# Altium footprint library Hydrolib_pcb.PcbLib: 62 footprints (part 2 of 4)
Each footprint in its own frame and in the unit in brackets; x right, y up, seen from the top. Pads: shape width x height; smd on the part's side, far side on the other; paste and mask are expansions set on the pad; w line width, h text height; cw(c..) or ccw(c..) is an arc to the next point about the centre after c.
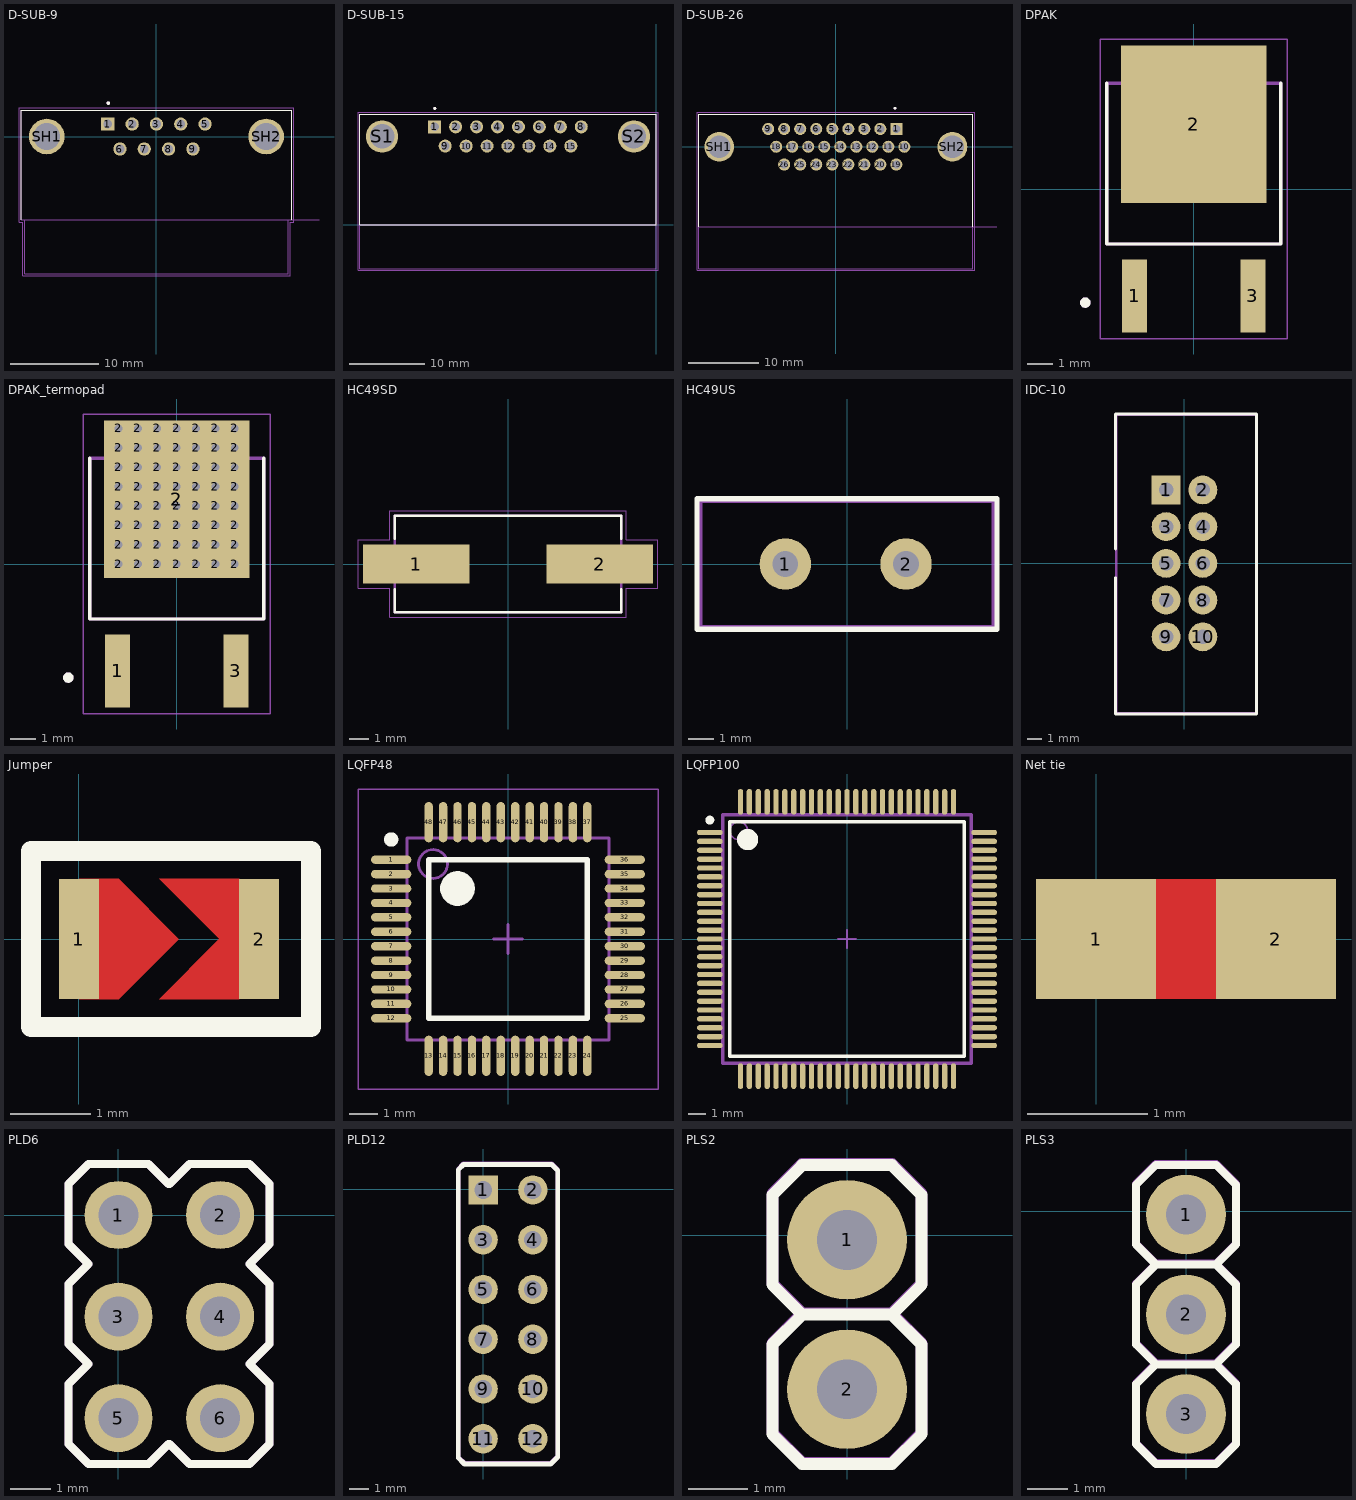
[diagram p1: the footprints below, top view; thin cyan lines are the x and y axes]

## D-SUB-9 [mm]
height 12.8
pads (11):
  rect 1.508x1.508 / inner round 1.508 / far side rect 1.508x1.508 hole 1: 1(-5.54,1.42)
  round 1.508 hole 1: 2(-2.77,1.42) 3(0,1.42) 4(2.77,1.42) 5(5.54,1.42) 6(-4.155,-1.42) 7(-1.385,-1.42) 8(1.385,-1.42) 9(4.155,-1.42)
  round 4.066 hole 3.05: SH1(-12.495,0) SH2(12.495,0)
Top Overlay:
  circle w0.2: c-5.48,3.8 r0.1
  lines w0.127: -15.405,-9.5 -15.405,3 15.405,3 15.405,-9.5
Mechanical 13:
  circle w0.2: c-5.48,3.8 r0.1
  lines w0.127: 18.51,-9.5 15.405,-9.5 ; -15,-9.5 15,-9.5 ; -15,-9.5 -15,-15.6 15,-15.6 15,-9.5 ; -15,-9.5 -15.405,-9.5 -15.405,3 15.405,3 15.405,-9.5 ; 15,-9.5 15.405,-9.5
  text "PCB Edge" at 16,-9.31 h0.81
Mechanical 15:
  lines w0.05: -15.655,-9.75 -15.25,-9.75 -15.25,-15.85 15.25,-15.85 15.25,-9.75 15.655,-9.75 15.655,3.25 -15.655,3.25 -15.655,-9.75
3D body "A-DS 09 A_KG-T2S.STEP": height 12.8, standoff -4.4, extent -15.405,-15.55 15.405,3.05

## D-SUB-15 [mm]
height 12.93
pads (17):
  rect 1.725x1.725 / inner round 1.725 / far side rect 1.725x1.725 hole 1.15: 1(-29.286,12.929)
  round 1.725 hole 1.15: 2(-26.516,12.929) 3(-23.746,12.929) 4(-20.976,12.929) 5(-18.206,12.929) 6(-15.436,12.929) 7(-12.666,12.929) 8(-9.896,12.929) 9(-27.901,10.389) 10(-25.131,10.389) 11(-22.361,10.389) 12(-19.591,10.389) 13(-16.821,10.389) 14(-14.051,10.389) 15(-11.281,10.389)
  round 4.266 hole 3.25: S1(-36.251,11.659) S2(-2.931,11.659)
Top Overlay:
  circle w0.2: c-29.281,15.376 r0.1
  lines w0.127: -39.186,-0.011 0.004,-0.011 0.004,14.589 -39.186,14.589 -39.186,-0.011
Mechanical 13:
  circle w0.2: c-29.281,15.376 r0.1
  lines w0.127: -39.186,-0.011 -39.186,-5.811 0.004,-5.811 0.004,-0.011 ; -39.186,-0.011 -39.186,14.589 0.004,14.589 0.004,-0.011 ; -39.186,-0.011 0.004,-0.011
Mechanical 15:
  lines w0.05: -39.436,-6.061 -39.436,14.839 0.254,14.839 0.254,-6.061 -39.436,-6.061
3D body "step_temp.STEP": height 12.55, standoff -4.18, extent -39.186,-5.811 0.004,14.589

## D-SUB-26 [mm]
pads (28):
  rect 1.725x1.725 / inner round 1.725 / far side rect 1.725x1.725 hole 1.15: 1(8.65,2.54)
  round 1.725 hole 1.15: 2(6.36,2.54) 3(4.07,2.54) 4(1.78,2.54) 5(-0.51,2.54) 6(-2.8,2.54) 7(-5.09,2.54) 8(-7.38,2.54) 9(-9.67,2.54) 10(9.795,0) 11(7.505,0) 12(5.215,0) 13(2.925,0) 14(0.635,0) 15(-1.655,0) 16(-3.945,0) 17(-6.235,0) 18(-8.525,0) 19(8.65,-2.54) 20(6.36,-2.54) 21(4.07,-2.54) 22(1.78,-2.54) 23(-0.51,-2.54) 24(-2.8,-2.54) 25(-5.09,-2.54) 26(-7.38,-2.54)
  round 4.266 hole 3.25: SH1(-16.66,0) SH2(16.66,0)
Top Overlay:
  circle w0.2: c8.455,5.5 r0.1
  lines w0.127: -19.595,-11.43 -19.595,4.67 19.595,4.67 19.595,-11.43
Mechanical 13:
  circle w0.2: c8.455,5.5 r0.1
  lines w0.127: 23.035,-11.43 19.595,-11.43 ; -19.595,-11.43 -19.595,4.67 19.595,4.67 19.595,-11.43 ; -19.595,-11.43 -19.595,-17.43 19.595,-17.43 19.595,-11.43 ; -19.595,-11.43 19.595,-11.43
  text "PCB Edge" at 20.295,-11.295 h0.81
Mechanical 15:
  lines w0.05: -19.845,-17.68 -19.845,4.92 19.845,4.92 19.845,-17.68 -19.845,-17.68
3D body "step_temp.STEP": height 12.55, standoff -3.8, extent -19.61,-17.43 19.61,4.67

## DPAK [mm]
pads (3):
  rect 0.97x2.83 smd: 1(-2.29,-4.14) 3(2.29,-4.14)
  rect 5.63x6.09 smd: 2(0,2.51)
Top Overlay:
  circle w0.2: c-4.2,-4.4 r0.1
  lines w0.127: -3.37,4.093 -3.37,-2.128 3.37,-2.128 3.37,4.093
Mechanical 13:
  circle w0.2: c-4.2,-4.4 r0.1
  lines w0.127: -3.37,-2.128 3.37,-2.128 3.37,4.093 -3.37,4.093 -3.37,-2.128
Mechanical 15:
  lines w0.05: -3.62,-5.81 3.62,-5.81 3.62,5.81 -3.62,5.81 -3.62,-5.81
3D body "step_temp.STEP": height 2.39, standoff 0, extent -3.27,-4.959 3.27,4.959

## DPAK_termopad [mm]
pads (59):
  rect 0.97x2.83 smd: 1(-2.29,-4.14) 3(2.29,-4.14)
  round 0.6 hole 0.3: 2(-2.25,0) 2(-2.25,0.75) 2(-2.25,1.5) 2(-2.25,2.25) 2(-2.25,3) 2(-2.25,3.75) 2(-2.25,4.5) 2(-2.25,5.25) 2(-1.5,0) 2(-1.5,0.75) 2(-1.5,1.5) 2(-1.5,2.25) 2(-1.5,3) 2(-1.5,3.75) 2(-1.5,4.5) 2(-1.5,5.25) 2(-0.75,0) 2(-0.75,0.75) 2(-0.75,1.5) 2(-0.75,2.25) 2(-0.75,3) 2(-0.75,3.75) 2(-0.75,4.5) 2(-0.75,5.25) 2(0,0) 2(0,0.75) 2(0,1.5) 2(0,2.25) 2(0,3) 2(0,3.75) 2(0,4.5) 2(0,5.25) 2(0.75,0) 2(0.75,0.75) 2(0.75,1.5) 2(0.75,2.25) 2(0.75,3) 2(0.75,3.75) 2(0.75,4.5) 2(0.75,5.25) 2(1.5,0) 2(1.5,0.75) 2(1.5,1.5) 2(1.5,2.25) 2(1.5,3) 2(1.5,3.75) 2(1.5,4.5) 2(1.5,5.25) 2(2.25,0) 2(2.25,0.75) 2(2.25,1.5) 2(2.25,2.25) 2(2.25,3) 2(2.25,3.75) 2(2.25,4.5) 2(2.25,5.25)
  rect 5.63x6.09 smd: 2(0,2.51)
Top Overlay:
  circle w0.2: c-4.2,-4.4 r0.1
  lines w0.127: -3.37,4.093 -3.37,-2.128 3.37,-2.128 3.37,4.093
Mechanical 13:
  circle w0.2: c-4.2,-4.4 r0.1
  lines w0.127: -3.37,-2.128 -3.37,4.093 3.37,4.093 3.37,-2.128 -3.37,-2.128
Mechanical 15:
  lines w0.05: -3.62,-5.81 -3.62,5.81 3.62,5.81 3.62,-5.81 -3.62,-5.81
3D body "step_temp.STEP": height 2.39, standoff 0, extent -3.27,-4.959 3.27,4.959

## HC49SD [mm]
height 4.5
pads (2):
  rect 5.5x2 smd: 1(-4.75,0) 2(4.75,0)
Top Overlay:
  lines w0.127: -5.85,-1.315 -5.85,-2.5 5.85,-2.5 5.85,-1.315 ; -5.85,1.315 -5.85,2.5 5.85,2.5 5.85,1.315
Mechanical 13:
  lines w0.127: -5.85,-2.5 5.85,-2.5 5.85,2.5 -5.85,2.5 -5.85,-2.5
Mechanical 15:
  lines w0.05: -7.75,-1.25 -7.75,1.25 -6.1,1.25 -6.1,2.75 6.1,2.75 6.1,1.25 7.75,1.25 7.75,-1.25 6.1,-1.25 6.1,-2.75 -6.1,-2.75 -6.1,-1.25 -7.75,-1.25
3D body "step_temp.STEP": height 4.5, standoff 0, extent -6.75,-2.5 6.75,2.5

## HC49US [mm]
pads (2):
  round 2 hole 1: 1(-2.4,0) 2(2.3,0)
Top Overlay:
  lines w0.2: -5.842,-2.54 5.842,-2.54 5.842,2.54 -5.842,2.54 -5.842,-2.54
Mechanical 4:
  text ".Designator" at -4.1,3.5 h2.15
Mechanical 5:
  lines w0.25: 5,-2.5 -5,-2.5 ; -5,-2.5 5.75,-2.5 5.75,2.5 5,2.5 -5,2.5 -5.75,2.5 -5.75,-2.5 -5,-2.5
3D body "XTAL-HP49US.STEP": height 3.5, standoff -3, extent -5.675,-2.25 5.675,2.4

## IDC-10 [mm] "IDC-10 Male Connector"
height 9
pads (10):
  rect 2x2 hole 1: 1(-1.25,5.075)
  round 2 hole 1: 2(1.29,5.075) 3(-1.25,2.535) 4(1.29,2.535) 5(-1.25,-0.005) 6(1.29,-0.005) 7(-1.25,-2.545) 8(1.29,-2.545) 9(-1.25,-5.085) 10(1.29,-5.085)
Top Overlay:
  lines w0.2: -4.75,-1 -4.75,-10.425 5,-10.425 5,10.325 -4.75,10.325 -4.75,1
Mechanical 4:
  lines w0.2: -4.7,-10.4 5,-10.4 5,10.3 -4.7,10.3 -4.7,-10.4
  text ".Designator" at -4.3,7.4 h2.15
3D body "User Library-BH-10__64BH-10.STEP": height 9.1, standoff -3, extent -4.53,-10.305 4.77,10.195

## Jumper [mm]
pads (2):
  rect 0.5x1.5 smd: 1(0,0) 2(2.25,0)
Top Layer:
  pour cut-out: -0.2,0.5
  region: 0,0.75 0.5,0.75 1.25,0 0.5,-0.75 0,-0.75
  region: 1,0.75 1.75,0 1,-0.75 2,-0.75 2,0.75
Top Overlay:
  lines w0.254: -0.6,-1.1 2.9,-1.1 2.9,1.1 -0.6,1.1 -0.6,-1.1

## LQFP48 [mm] "TSQFP, 48-Leads, Body 7,00x7,00mm, Pitch 0,50mm, IPC Medium Density"
height 1.6
pads (48):
  oval 1.4x0.29 smd: 1(-4.05,2.75) 2(-4.05,2.25) 3(-4.05,1.75) 4(-4.05,1.25) 5(-4.05,0.75) 6(-4.05,0.25) 7(-4.05,-0.25) 8(-4.05,-0.75) 9(-4.05,-1.25) 10(-4.05,-1.75) 11(-4.05,-2.25) 12(-4.05,-2.75)
  oval 0.29x1.4 smd paste+0 mask+0.09: 13(-2.75,-4.05) 14(-2.25,-4.05) 15(-1.75,-4.05) 16(-1.25,-4.05) 17(-0.75,-4.05) 18(-0.25,-4.05) 19(0.25,-4.05) 20(0.75,-4.05) 21(1.25,-4.05) 22(1.75,-4.05) 23(2.25,-4.05) 24(2.75,-4.05) 37(2.75,4.05) 38(2.25,4.05) 39(1.75,4.05) 40(1.25,4.05) 41(0.75,4.05) 42(0.25,4.05) 43(-0.25,4.05) 44(-0.75,4.05) 45(-1.25,4.05) 46(-1.75,4.05) 47(-2.25,4.05) 48(-2.75,4.05)
  oval 1.4x0.29 smd paste+0 mask+0.09: 25(4.05,-2.75) 26(4.05,-2.25) 27(4.05,-1.75) 28(4.05,-1.25) 29(4.05,-0.75) 30(4.05,-0.25) 31(4.05,0.25) 32(4.05,0.75) 33(4.05,1.25) 34(4.05,1.75) 35(4.05,2.25) 36(4.05,2.75)
Top Overlay:
  circle w0.25: c-4.05,3.45 r0.125
  circle w0.6: c-1.75,1.75 r0.3
  lines w0.2: -2.75,-2.75 -2.75,2.75 2.75,2.75 2.75,-2.75 -2.75,-2.75
Mechanical 1:
  circle w0.1: c-2.6,2.6 r0.5
  lines w0.1: -3.5,-3.5 -3.5,3.5 3.5,3.5 3.5,-3.5 -3.5,-3.5
Mechanical 15:
  lines w0.05: -5.2,-5.2 -5.2,5.2 5.2,5.2 5.2,-5.2 -5.2,-5.2
  lines w0.1: -0.5,0 0.5,0 ; 0,-0.5 0,0.5
3D body "stm32f103c8t6.stp": height 1.48, standoff 0, extent -4.5,-4.475 4.5,4.525

## LQFP100 [mm] "TSQFP, 100-Leads, Body 14,00x14,00mm, Pitch 0,50mm, IPC Medium Density"
height 1.6
pads (100):
  oval 1.45x0.3 smd: 1(-7.725,6) 2(-7.725,5.5) 3(-7.725,5) 4(-7.725,4.5) 5(-7.725,4) 6(-7.725,3.5) 7(-7.725,3) 8(-7.725,2.5) 9(-7.725,2) 10(-7.725,1.5) 11(-7.725,1) 12(-7.725,0.5) 13(-7.725,0) 14(-7.725,-0.5) 15(-7.725,-1) 16(-7.725,-1.5) 17(-7.725,-2) 18(-7.725,-2.5) 19(-7.725,-3) 20(-7.725,-3.5) 21(-7.725,-4) 22(-7.725,-4.5) 23(-7.725,-5) 24(-7.725,-5.5) 25(-7.725,-6) 51(7.725,-6) 52(7.725,-5.5) 53(7.725,-5) 54(7.725,-4.5) 55(7.725,-4) 56(7.725,-3.5) 57(7.725,-3) 58(7.725,-2.5) 59(7.725,-2) 60(7.725,-1.5) 61(7.725,-1) 62(7.725,-0.5) 63(7.725,0) 64(7.725,0.5) 65(7.725,1) 66(7.725,1.5) 67(7.725,2) 68(7.725,2.5) 69(7.725,3) 70(7.725,3.5) 71(7.725,4) 72(7.725,4.5) 73(7.725,5) 74(7.725,5.5) 75(7.725,6)
  oval 0.3x1.45 smd: 26(-6,-7.725) 27(-5.5,-7.725) 28(-5,-7.725) 29(-4.5,-7.725) 30(-4,-7.725) 31(-3.5,-7.725) 32(-3,-7.725) 33(-2.5,-7.725) 34(-2,-7.725) 35(-1.5,-7.725) 36(-1,-7.725) 37(-0.5,-7.725) 38(0,-7.725) 39(0.5,-7.725) 40(1,-7.725) 41(1.5,-7.725) 42(2,-7.725) 43(2.5,-7.725) 44(3,-7.725) 45(3.5,-7.725) 46(4,-7.725) 47(4.5,-7.725) 48(5,-7.725) 49(5.5,-7.725) 50(6,-7.725) 76(6,7.725) 77(5.5,7.725) 78(5,7.725) 79(4.5,7.725) 80(4,7.725) 81(3.5,7.725) 82(3,7.725) 83(2.5,7.725) 84(2,7.725) 85(1.5,7.725) 86(1,7.725) 87(0.5,7.725) 88(0,7.725) 89(-0.5,7.725) 90(-1,7.725) 91(-1.5,7.725) 92(-2,7.725) 93(-2.5,7.725) 94(-3,7.725) 95(-3.5,7.725) 96(-4,7.725) 97(-4.5,7.725) 98(-5,7.725) 99(-5.5,7.725) 100(-6,7.725)
Top Overlay:
  circle w0.6: c-5.6,5.6 r0.3
  circle w0.25: c-7.725,6.7 r0.125
  lines w0.2: -6.6,-6.6 6.6,-6.6 6.6,6.6 -6.6,6.6 -6.6,-6.6
Mechanical 4:
  lines w0.2: -7,-7 7,-7 7,7 -7,7 -7,-7
Mechanical 13:
  circle w0.1: c-6.1,6.1 r0.5
Mechanical 15:
  lines w0.1: -0.5,0 0.5,0 ; 0,-0.5 0,0.5
3D body "LQFP100.step": height 1.6, standoff 0, extent -8,-8 8,8

## Net tie [mm]
pads (2):
  rect 1x1 smd paste-30 mask+0: 1(0,0)
  rect 1x1 smd paste-10 mask-10: 2(1.5,0)
Top Layer:
  region: 0,0.5 0,-0.5 1.5,-0.5 1.5,0.5
  region: -0.5,0.5

## PLD6 [mm]
pads (6):
  round 1.7 hole 1 paste+0: 1(0,0) 2(2.54,0) 3(0,-2.54) 4(2.54,-2.54) 5(0,-5.08) 6(2.54,-5.08)
Top Overlay:
  lines w0.2: 1.25,-5.725 0.75,-6.225 -0.75,-6.225 -1.25,-5.725 -1.25,-4.225 -0.75,-3.725 -1.25,-3.225 -1.25,-1.725 -0.75,-1.225 -1.25,-0.725 -1.25,0.775 -0.75,1.275 0.75,1.275 1.25,0.775 ; 1.275,-5.725 1.775,-6.225 3.275,-6.225 3.775,-5.725 3.775,-4.225 3.275,-3.725 3.775,-3.225 3.775,-1.725 3.275,-1.225 3.775,-0.725 3.775,0.775 3.275,1.275 1.775,1.275 1.275,0.775
Mechanical 4:
  lines w0.2: 1.25,-5.725 0.75,-6.225 -0.75,-6.225 -1.25,-5.725 -1.25,-4.225 -0.75,-3.725 -1.25,-3.225 -1.25,-1.725 -0.75,-1.225 -1.25,-0.725 -1.25,0.775 -0.75,1.275 0.75,1.275 1.25,0.775 ; 1.275,-5.725 1.775,-6.225 3.275,-6.225 3.775,-5.725 3.775,-4.225 3.275,-3.725 3.775,-3.225 3.775,-1.725 3.275,-1.225 3.775,-0.725 3.775,0.775 3.275,1.275 1.775,1.275 1.275,0.775
  text ".Designator" at -3.1,2 h2.15
3D body "User Library-PLS-1.STEP": height 8.44, standoff -3, extent -1.27,-6.35 1.27,-3.81
3D body "User Library-PLS-1.STEP": height 8.44, standoff -3, extent 1.27,-6.35 3.81,-3.81
3D body "User Library-PLS-1.STEP": height 8.44, standoff -3, extent 1.27,-3.81 3.81,-1.27
3D body "User Library-PLS-1.STEP": height 8.44, standoff -3, extent -1.27,-3.81 1.27,-1.27
3D body "User Library-PLS-1.STEP": height 8.44, standoff -3, extent 1.27,-1.27 3.81,1.27
3D body "User Library-PLS-1.STEP": height 8.44, standoff -3, extent -1.27,-1.27 1.27,1.27

## PLD12 [mm]
pads (12):
  rect 1.5x1.5 hole 0.9: 1(0,-0.025)
  round 1.5 hole 0.9: 2(2.54,-0.025) 3(0,-2.565) 4(2.54,-2.565) 5(0,-5.105) 6(2.54,-5.105) 7(0,-7.645) 8(2.54,-7.645) 9(0,-10.185) 10(2.54,-10.185) 11(0,-12.725) 12(2.54,-12.725)
Top Overlay:
  lines w0.254: -1.27,-13.7 -1.27,1.005 -1,1.275 3.5,1.275 3.81,0.965 3.81,-13.65 ; -1.27,-13.695 -0.95,-14.015 3.45,-14.015 3.81,-13.655
Mechanical 4:
  lines w0.254: -1.27,-13.675 -1.27,1.03 -1,1.3 3.5,1.3 3.81,0.99 3.81,-13.625 ; -1.27,-13.67 -0.95,-13.99 3.45,-13.99 3.81,-13.63
  text ".Designator" at -2.8,2.2 h2.15
3D body "User Library-PLS-1.STEP": height 8.44, standoff -3, extent 1.27,-11.455 3.81,-8.915
3D body "User Library-PLS-1.STEP": height 8.44, standoff -3, extent -1.27,-11.455 1.27,-8.915
3D body "User Library-PLS-1.STEP": height 8.44, standoff -3, extent -1.27,-8.915 1.27,-6.375
3D body "User Library-PLS-1.STEP": height 8.44, standoff -3, extent 1.27,-8.915 3.81,-6.375
3D body "User Library-PLS-1.STEP": height 8.44, standoff -3, extent 1.27,-6.375 3.81,-3.835
3D body "User Library-PLS-1.STEP": height 8.44, standoff -3, extent -1.27,-6.375 1.27,-3.835
3D body "User Library-PLS-1.STEP": height 8.44, standoff -3, extent 1.27,-3.835 3.81,-1.295
3D body "User Library-PLS-1.STEP": height 8.44, standoff -3, extent -1.27,-3.835 1.27,-1.295
3D body "User Library-PLS-1.STEP": height 8.44, standoff -3, extent 1.27,-1.295 3.81,1.245
3D body "User Library-PLS-1.STEP": height 8.44, standoff -3, extent -1.27,-1.295 1.27,1.245
3D body "User Library-PLS-1.STEP": height 8.44, standoff -3, extent -1.27,-13.995 1.27,-11.455
3D body "User Library-PLS-1.STEP": height 8.44, standoff -3, extent 1.27,-13.995 3.81,-11.455

## PLS2 [mm]
pads (2):
  round 2 hole 1: 1(0,-0.08) 2(0,-2.58)
Top Overlay:
  lines w0.2: -0.75,-1.33 -1.25,-1.83 -1.25,-3.33 -0.75,-3.83 0.75,-3.83 1.25,-3.33 1.25,-1.83 0.75,-1.33 ; -0.75,-1.33 -1.25,-0.83 -1.25,0.67 -0.75,1.17 0.75,1.17 1.25,0.67 1.25,-0.83 0.75,-1.33 ; -0.75,-1.33 0.75,-1.33
Mechanical 4:
  lines w0.2: -0.75,-3.81 0.75,-3.81 ; -0.75,-3.81 0.75,-3.81 ; -0.75,-3.81 -1.25,-3.31 -1.25,-1.81 -0.75,-1.31 ; -0.75,-1.31 0.75,-1.31 ; -0.75,-1.31 0.75,-1.31 ; -0.75,-1.31 -1.25,-0.81 -1.25,0.69 -0.75,1.19 0.75,1.19 1.25,0.69 1.25,-0.81 0.75,-1.31 ; 0.75,-3.81 1.25,-3.31 1.25,-1.81 0.75,-1.31
  text ".Designator" at -4.2,1.9 h2.15
3D body "User Library-PLS-1.STEP": height 8.44, standoff -3, extent -1.27,-3.89 1.27,-1.35
3D body "User Library-PLS-1.STEP": height 8.44, standoff -3, extent -1.27,-1.35 1.27,1.19

## PLS3 [mm]
pads (3):
  round 2 hole 1: 1(0,-0.08) 2(0,-2.58) 3(0,-5.08)
Top Overlay:
  lines w0.2: -0.75,-3.83 0.75,-3.83 ; -0.75,-3.83 -1.25,-4.33 -1.25,-5.83 -0.75,-6.33 0.75,-6.33 1.25,-5.83 1.25,-4.33 0.75,-3.83 ; -0.75,-3.83 -1.25,-3.33 -1.25,-1.83 -0.75,-1.33 ; -0.75,-1.33 -1.25,-0.83 -1.25,0.67 -0.75,1.17 0.75,1.17 1.25,0.67 1.25,-0.83 0.75,-1.33 ; -0.75,-1.33 0.75,-1.33 ; 0.75,-3.83 1.25,-3.33 1.25,-1.83 0.75,-1.33
Mechanical 4:
  lines w0.2: -0.75,-6.31 0.75,-6.31 ; -0.75,-6.31 0.75,-6.31 ; -0.75,-6.31 -1.25,-5.81 -1.25,-4.31 -0.75,-3.81 ; -0.75,-3.81 0.75,-3.81 ; -0.75,-3.81 0.75,-3.81 ; -0.75,-3.81 -1.25,-3.31 -1.25,-1.81 -0.75,-1.31 ; -0.75,-1.31 0.75,-1.31 ; -0.75,-1.31 0.75,-1.31 ; -0.75,-1.31 -1.25,-0.81 -1.25,0.69 -0.75,1.19 0.75,1.19 1.25,0.69 1.25,-0.81 0.75,-1.31 ; 0.75,-6.31 1.25,-5.81 1.25,-4.31 0.75,-3.81 ; 0.75,-3.81 1.25,-3.31 1.25,-1.81 0.75,-1.31
  text ".Designator" at -4.2,1.9 h2.15
3D body "User Library-PLS-1.STEP": height 8.44, standoff -3, extent -1.27,-6.43 1.27,-3.89
3D body "User Library-PLS-1.STEP": height 8.44, standoff -3, extent -1.27,-3.89 1.27,-1.35
3D body "User Library-PLS-1.STEP": height 8.44, standoff -3, extent -1.27,-1.35 1.27,1.19